# Altium schematic symbol library MAX40200AUK+T.SchLib: 1 symbol
Pins are listed as number, name and electrical type; pins without a type are passive.

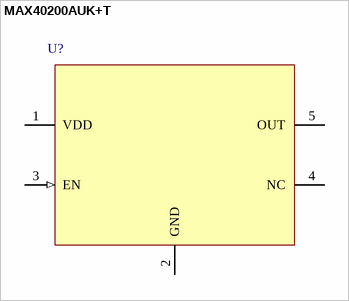
[diagram p0: symbol MAX40200AUK+T]

## MAX40200AUK+T
designator U?
Ideal diode with enable, 1.5-5.5V, 1A, reverse blocking, SOT-23-5
pins: 1 VDD (power), 2 GND (power), 3 EN (in), 4 NC, 5 OUT